# Altium footprint library FootPrintLib_12.PcbLib: 319 footprints (part 12 of 20)
Each footprint in its own frame and in the unit in brackets; x right, y up, seen from the top. Pads: shape width x height; smd on the part's side, far side on the other; paste and mask are expansions set on the pad; w line width, h text height; cw(c..) or ccw(c..) is an arc to the next point about the centre after c.
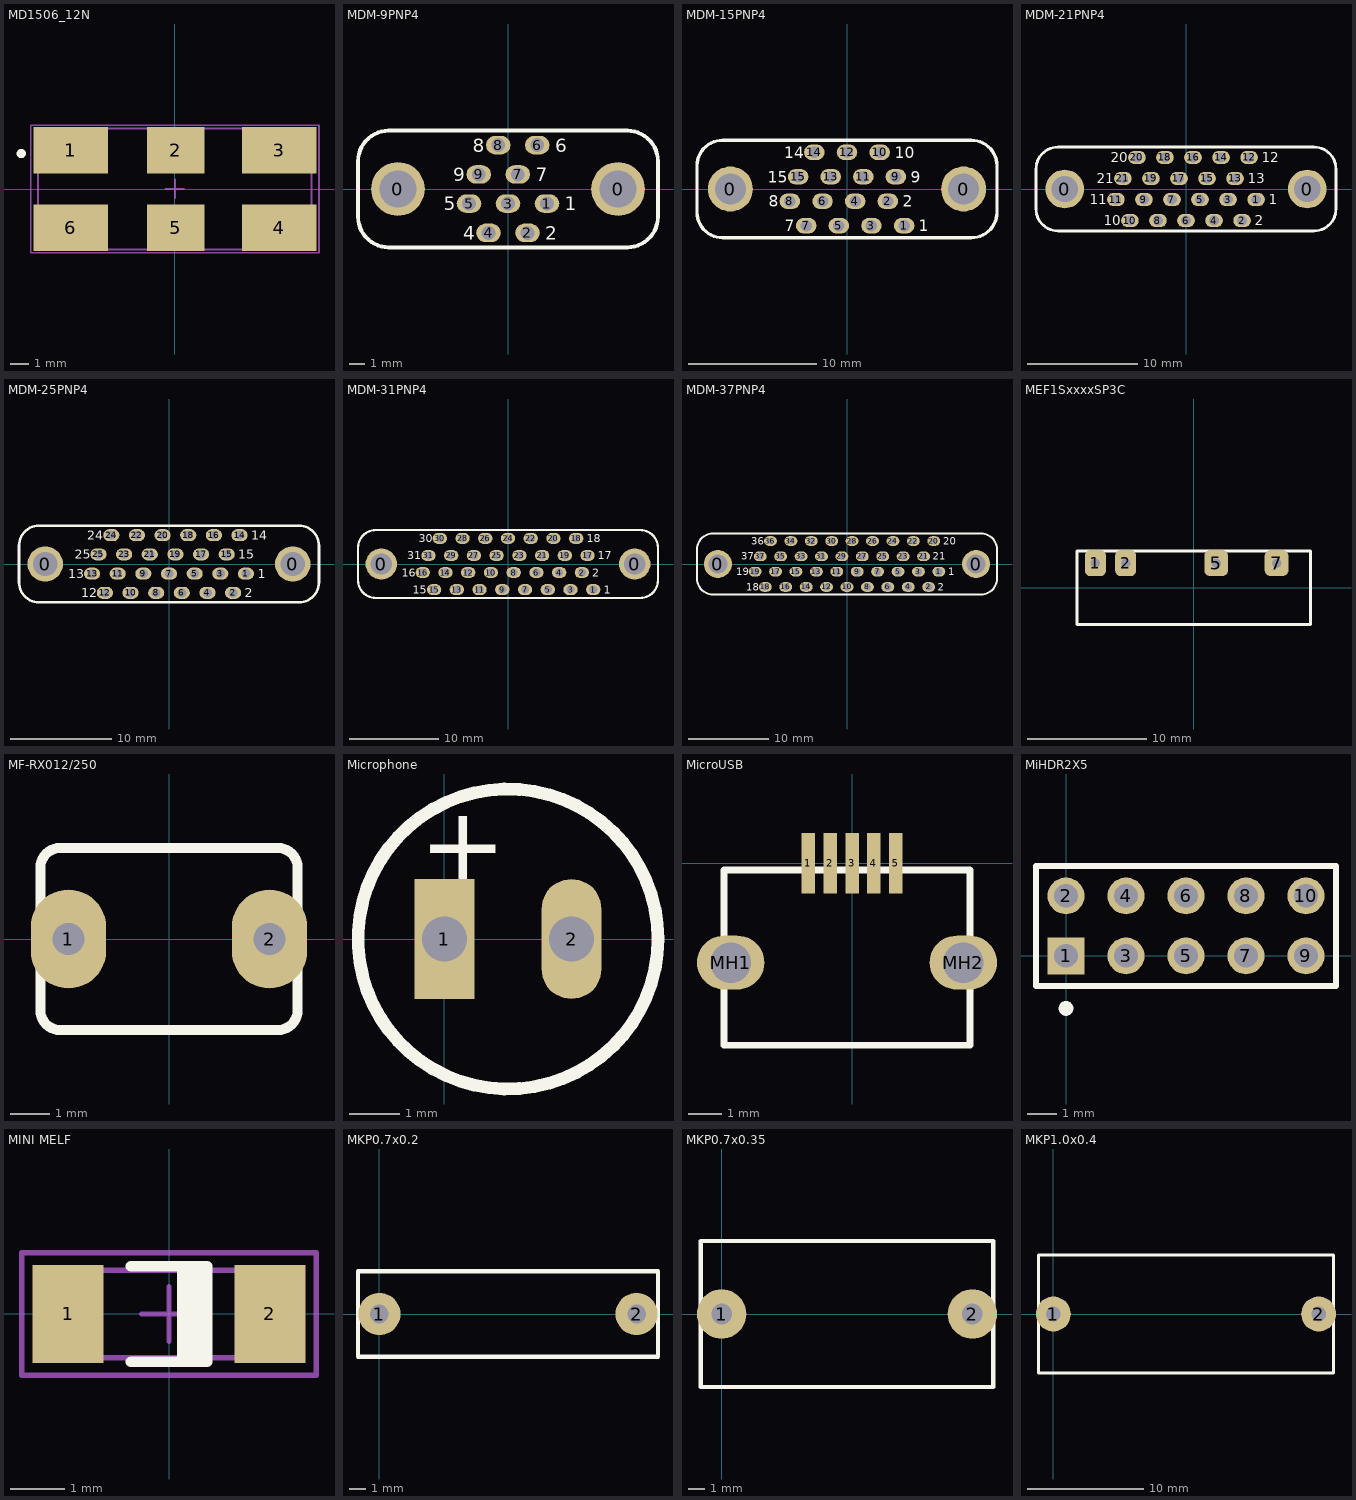
[diagram p11: the footprints below, top view; thin cyan lines are the x and y axes]

## MD1506_12N [mm] "MD1506©\12N  (820MHz~1950MHz)Multilayer  Chip  Antenna"
pads (6):
  rect 4x2.5 smd: 1(-5.6,2.075) 3(5.6,2.075) 4(5.6,-2.075) 6(-5.6,-2.075)
  rect 3.1x2.5 smd: 2(0.05,2.075) 5(0.05,-2.075)
Top Overlay:
  circle w0.25: c-8.255,1.905 r0.125
Mechanical 13:
  lines w0.1: -7.35,-3.25 -7.35,3.25 7.35,3.25 7.35,-3.25 -7.35,-3.25
  text "820MHz~1950MHz" at -7.112,0.254 h0.25
Mechanical 15:
  lines w0.1: -0.5,0.004 0.5,0.004 ; 0,-0.496 0,0.504 ; -7.747,-3.429 7.747,-3.429 7.747,3.429 -7.747,3.429 -7.747,-3.429
3D body "User Library-Antenna-MD1506_12N.STEP": height 1.6, standoff -0.01, extent -7.35,-3.25 7.35,3.25

## MDM-9PNP4 [mm] "MDM Stright PCB N Type Male 9-Pin"
height 10.3
pads (11):
  round 3.5 hole 2.4: 0(-7.175,0) 0(7.175,0)
  oval 1.6x1.2 hole 0.9: 1(2.54,-0.953) 2(1.27,-2.857) 3(0,-0.953) 4(-1.27,-2.857) 5(-2.54,-0.953) 6(1.905,2.857) 7(0.635,0.953) 8(-0.635,2.857) 9(-1.905,0.953)
Top Overlay:
  lines w0.254: -9.775,-1.8 ccw(c-7.775,-1.8) -7.775,-3.8 7.775,-3.8 ccw(c7.775,-1.8) 9.775,-1.8 9.775,1.8 ccw(c7.775,1.8) 7.775,3.8 -7.775,3.8 ccw(c-7.775,1.8) -9.775,1.8 -9.775,-1.8
  text "6" at 3.065,2.41 h0.89
  text "7" at 1.795,0.505 h0.89
  text "2" at 2.43,-3.305 h0.89
  text "8" at -2.295,2.41 h0.89
  text "9" at -3.565,0.505 h0.89
  text "4" at -2.93,-3.305 h0.89
  text "5" at -4.2,-1.4 h0.89
  text "1" at 3.7,-1.4 h0.89

## MDM-15PNP4 [mm] "MDM Stright PCB N Type Male 15-Pin"
height 10.3
pads (17):
  round 3.5 hole 2.4: 0(-9.08,0) 0(9.08,0)
  oval 1.6x1.2 hole 0.9: 1(4.445,-2.857) 2(3.175,-0.953) 3(1.905,-2.857) 4(0.635,-0.953) 5(-0.635,-2.857) 6(-1.905,-0.953) 7(-3.175,-2.857) 8(-4.445,-0.953) 9(3.81,0.953) 10(2.54,2.857) 11(1.27,0.953) 12(0,2.857) 13(-1.27,0.953) 14(-2.54,2.857) 15(-3.81,0.953)
Top Overlay:
  lines w0.254: -11.68,-1.8 ccw(c-9.68,-1.8) -9.68,-3.8 9.68,-3.8 ccw(c9.68,-1.8) 11.68,-1.8 11.68,1.8 ccw(c9.68,1.8) 9.68,3.8 -9.68,3.8 ccw(c-9.68,1.8) -11.68,1.8 -11.68,-1.8
  text "2" at 4.335,-1.4 h0.89
  text "8" at -6.105,-1.4 h0.89
  text "7" at -4.835,-3.305 h0.89
  text "15" at -6.17,0.505 h0.89
  text "14" at -4.9,2.41 h0.89
  text "1" at 5.605,-3.305 h0.89
  text "9" at 4.97,0.505 h0.89
  text "10" at 3.7,2.41 h0.89

## MDM-21PNP4 [mm] "MDM Stright PCB N Type Male 21-Pin"
height 10.3
pads (23):
  round 3.5 hole 2.4: 0(-10.985,0) 0(10.985,0)
  oval 1.6x1.2 hole 0.9: 1(6.35,-0.953) 2(5.08,-2.857) 3(3.81,-0.953) 4(2.54,-2.857) 5(1.27,-0.953) 6(0,-2.857) 7(-1.27,-0.953) 8(-2.54,-2.857) 9(-3.81,-0.953) 10(-5.08,-2.857) 11(-6.35,-0.953) 12(5.715,2.857) 13(4.445,0.953) 14(3.175,2.857) 15(1.905,0.953) 16(0.635,2.857) 17(-0.635,0.953) 18(-1.905,2.857) 19(-3.175,0.953) 20(-4.445,2.857) 21(-5.715,0.953)
Top Overlay:
  lines w0.254: -13.585,-1.8 ccw(c-11.585,-1.8) -11.585,-3.8 11.585,-3.8 ccw(c11.585,-1.8) 13.585,-1.8 13.585,1.8 ccw(c11.585,1.8) 11.585,3.8 -11.585,3.8 ccw(c-11.585,1.8) -13.585,1.8 -13.585,-1.8
  text "1" at 7.51,-1.4 h0.89
  text "21" at -8.075,0.505 h0.89
  text "20" at -6.805,2.41 h0.89
  text "2" at 6.24,-3.305 h0.89
  text "13" at 5.605,0.505 h0.89
  text "12" at 6.875,2.41 h0.89
  text "11" at -8.71,-1.4 h0.89
  text "10" at -7.44,-3.305 h0.89

## MDM-25PNP4 [mm] "MDM Stright PCB N Type Male 25-Pin"
height 10.3
pads (27):
  round 3.5 hole 2.4: 0(-12.255,0) 0(12.255,0)
  oval 1.6x1.2 hole 0.9: 1(7.62,-0.953) 2(6.35,-2.857) 3(5.08,-0.953) 4(3.81,-2.857) 5(2.54,-0.953) 6(1.27,-2.857) 7(0,-0.953) 8(-1.27,-2.857) 9(-2.54,-0.953) 10(-3.81,-2.857) 11(-5.08,-0.953) 12(-6.35,-2.857) 13(-7.62,-0.953) 14(6.985,2.857) 15(5.715,0.953) 16(4.445,2.857) 17(3.175,0.953) 18(1.905,2.857) 19(0.635,0.953) 20(-0.635,2.857) 21(-1.905,0.953) 22(-3.175,2.857) 23(-4.445,0.953) 24(-5.715,2.857) 25(-6.985,0.953)
Top Overlay:
  lines w0.254: -14.855,-1.8 ccw(c-12.855,-1.8) -12.855,-3.8 12.855,-3.8 ccw(c12.855,-1.8) 14.855,-1.8 14.855,1.8 ccw(c12.855,1.8) 12.855,3.8 -12.855,3.8 ccw(c-12.855,1.8) -14.855,1.8 -14.855,-1.8
  text "12" at -8.71,-3.305 h0.89
  text "13" at -9.98,-1.4 h0.89
  text "14" at 8.145,2.41 h0.89
  text "15" at 6.875,0.505 h0.89
  text "2" at 7.51,-3.305 h0.89
  text "24" at -8.075,2.41 h0.89
  text "25" at -9.345,0.505 h0.89
  text "1" at 8.78,-1.4 h0.89

## MDM-31PNP4 [mm] "MDM Stright PCB N Type Male 31-Pin"
height 10.3
pads (33):
  round 3.5 hole 2.4: 0(-14.16,0) 0(14.16,0)
  oval 1.6x1.2 hole 0.9: 1(9.525,-2.857) 2(8.255,-0.953) 3(6.985,-2.857) 4(5.715,-0.953) 5(4.445,-2.857) 6(3.175,-0.953) 7(1.905,-2.857) 8(0.635,-0.953) 9(-0.635,-2.857) 10(-1.905,-0.953) 11(-3.175,-2.857) 12(-4.445,-0.953) 13(-5.715,-2.857) 14(-6.985,-0.953) 15(-8.255,-2.857) 16(-9.525,-0.953) 17(8.89,0.953) 18(7.62,2.857) 19(6.35,0.953) 20(5.08,2.857) 21(3.81,0.953) 22(2.54,2.857) 23(1.27,0.953) 24(0,2.857) 25(-1.27,0.953) 26(-2.54,2.857) 27(-3.81,0.953) 28(-5.08,2.857) 29(-6.35,0.953) 30(-7.62,2.857) 31(-8.89,0.953)
Top Overlay:
  lines w0.254: -16.76,-1.8 ccw(c-14.76,-1.8) -14.76,-3.8 14.76,-3.8 ccw(c14.76,-1.8) 16.76,-1.8 16.76,1.8 ccw(c14.76,1.8) 14.76,3.8 -14.76,3.8 ccw(c-14.76,1.8) -16.76,1.8 -16.76,-1.8
  text "2" at 9.415,-1.4 h0.89
  text "31" at -11.25,0.505 h0.89
  text "30" at -9.98,2.41 h0.89
  text "1" at 10.685,-3.305 h0.89
  text "17" at 10.05,0.505 h0.89
  text "18" at 8.78,2.41 h0.89
  text "16" at -11.885,-1.4 h0.89
  text "15" at -10.615,-3.305 h0.89

## MDM-37PNP4 [mm] "MDM Stright PCB N Type Male 37-Pin"
height 10.3
pads (39):
  round 3.5 hole 2.4: 0(-16.065,0) 0(16.065,0)
  oval 1.6x1.2 hole 0.9: 1(11.43,-0.953) 2(10.16,-2.857) 3(8.89,-0.953) 4(7.62,-2.857) 5(6.35,-0.953) 6(5.08,-2.857) 7(3.81,-0.953) 8(2.54,-2.857) 9(1.27,-0.953) 10(0,-2.857) 11(-1.27,-0.953) 12(-2.54,-2.857) 13(-3.81,-0.953) 14(-5.08,-2.857) 15(-6.35,-0.953) 16(-7.62,-2.857) 17(-8.89,-0.953) 18(-10.16,-2.857) 19(-11.43,-0.953) 20(10.795,2.857) 21(9.525,0.953) 22(8.255,2.857) 23(6.985,0.953) 24(5.715,2.857) 25(4.445,0.953) 26(3.175,2.857) 27(1.905,0.953) 28(0.635,2.857) 29(-0.635,0.953) 30(-1.905,2.857) 31(-3.175,0.953) 32(-4.445,2.857) 33(-5.715,0.953) 34(-6.985,2.857) 35(-8.255,0.953) 36(-9.525,2.857) 37(-10.795,0.953)
Top Overlay:
  lines w0.254: -18.665,-1.8 ccw(c-16.665,-1.8) -16.665,-3.8 16.665,-3.8 ccw(c16.665,-1.8) 18.665,-1.8 18.665,1.8 ccw(c16.665,1.8) 16.665,3.8 -16.665,3.8 ccw(c-16.665,1.8) -18.665,1.8 -18.665,-1.8
  text "18" at -12.52,-3.305 h0.89
  text "19" at -13.79,-1.4 h0.89
  text "20" at 11.955,2.41 h0.89
  text "21" at 10.685,0.505 h0.89
  text "2" at 11.32,-3.305 h0.89
  text "36" at -11.885,2.41 h0.89
  text "37" at -13.155,0.505 h0.89
  text "1" at 12.59,-1.4 h0.89

## MEF1SxxxxSP3C [mm] "Isolated DC/DC Converters 1W Iso"
height 10.15
pads (4):
  rrect50% 1.75x2.2 hole 0.8: 1(-8.285,2.075) 2(-5.745,2.075)
  rrect50% 2x2.2 hole 0.8: 5(1.875,2.075) 7(6.955,2.075)
Top Overlay:
  lines w0.254: -9.825,-3.075 9.825,-3.075 9.825,3.075 -9.825,3.075 -9.825,-3.075
3D body "User Library-DS0505.STEP": height 2.1, standoff -10.25, extent -9.83,-3.109 9.83,3.048

## MF-RX012/250 [mm] "Telecom PTC Resettable Fuses"
pads (2):
  oval 1.9x2.5 hole 0.8: 1(-2.54,0) 2(2.54,0)
Top Overlay:
  lines w0.254: -3.25,-1.8 ccw(c-2.75,-1.8) -2.75,-2.3 2.75,-2.3 ccw(c2.75,-1.8) 3.25,-1.8 3.25,1.8 ccw(c2.75,1.8) 2.75,2.3 -2.75,2.3 ccw(c-2.75,1.8) -3.25,1.8 -3.25,-1.8

## Microphone [mm] "Microphone"
pads (2):
  rect 1.2x2.4 hole 0.9: 1(0,0)
  oval 1.2x2.4 hole 0.9: 2(2.54,0)
Top Overlay:
  circle w0.254: c1.27,0 r3
  text "+" at -0.508,1.143 h1.52
3D body "User Library-Microphone-6.0mm-SMD.step": height 5.2, standoff -0.2, extent -1.73,-3.048 4.27,2.952

## MicroUSB [mm] "Shrink Small Outline, Plastic, Thin; 14 Leads; Body Width 4.4 mm; Pitch 0.65 mm"
height 1.1
pads (7):
  rect 0.4x1.8 smd: 1(-1.3,0) 2(-0.65,0) 3(0,0) 4(0.65,0) 5(1.3,0)
  oval 2x1.6 hole 1.2: MH1(-3.6,-2.95) MH2(3.3,-2.95)
Top Overlay:
  lines w0.2: -3.8,-5.4 -3.8,-0.2 3.5,-0.2 3.5,-5.4 -3.8,-5.4

## MiHDR2X5 [mm] "Connector; Header; 30 Position"
pads (10):
  rect 1.25x1.25 hole 0.8: 1(0,0)
  round 1.25 hole 0.8: 2(0,2.032) 3(2.032,0) 4(2.032,2.032) 5(4.064,0) 6(4.064,2.032) 7(6.096,0) 8(6.096,2.032) 9(8.128,0) 10(8.128,2.032)
Top Overlay:
  circle w0.25: c0.002,-1.778 r0.125
  lines w0.2: -1.016,-1.016 -1.016,3.048 9.144,3.048 9.144,-1.016 -1.016,-1.016

## MINI MELF [mm] "MELF Diode, 2-Leads, Body 3.5x1.4mm, IPC Medium Density"
height 1.6
pads (2):
  rect 1.3x1.8 smd: 1(-1.85,0) 2(1.85,0)
Top Overlay:
  rectangle: 0.15,-0.875 0.7,0.875
  lines w0.2: -0.7,-0.875 0.7,-0.875 0.7,0.875 -0.7,0.875
Mechanical 13:
  rectangle: 1.352,-0.8 1.85,0.8
  lines w0.1: -1.85,-0.8 1.85,-0.8 1.85,0.8 -1.85,0.8 -1.85,-0.8
Mechanical 15:
  lines w0.1: -0.5,0 0.5,0 ; 0,-0.5 0,0.5 ; -2.7,-1.125 2.7,-1.125 2.7,1.125 -2.7,1.125 -2.7,-1.125
3D body "minimelf-ll4148.STEP": height 1.38, standoff -0.02, extent -1.75,-0.7 1.75,0.7

## MKP0.7x0.2 [mm]
pads (2):
  round 2.5 hole 1.1: 1(0,0) 2(15.24,0)
Top Overlay:
  lines w0.254: -1.27,-2.54 16.51,-2.54 16.51,2.54 -1.27,2.54 -1.27,-2.54

## MKP0.7x0.35 [mm]
pads (2):
  round 3 hole 1.25: 1(0,0) 2(15.24,0)
Top Overlay:
  lines w0.254: -1.27,-4.445 -1.27,4.445 16.51,4.445 16.51,-4.445 -1.27,-4.445

## MKP1.0x0.4 [mm]
pads (2):
  round 3 hole 1.25: 1(0,0) 2(22.86,0)
Top Overlay:
  lines w0.254: -1.27,-5.08 -1.27,5.08 24.13,5.08 24.13,-5.08 -1.27,-5.08